# Altium footprint library FootPrintLib_3.PcbLib: 198 footprints (part 9 of 13)
Each footprint in its own frame and in the unit in brackets; x right, y up, seen from the top. Pads: shape width x height; smd on the part's side, far side on the other; paste and mask are expansions set on the pad; w line width, h text height; cw(c..) or ccw(c..) is an arc to the next point about the centre after c.
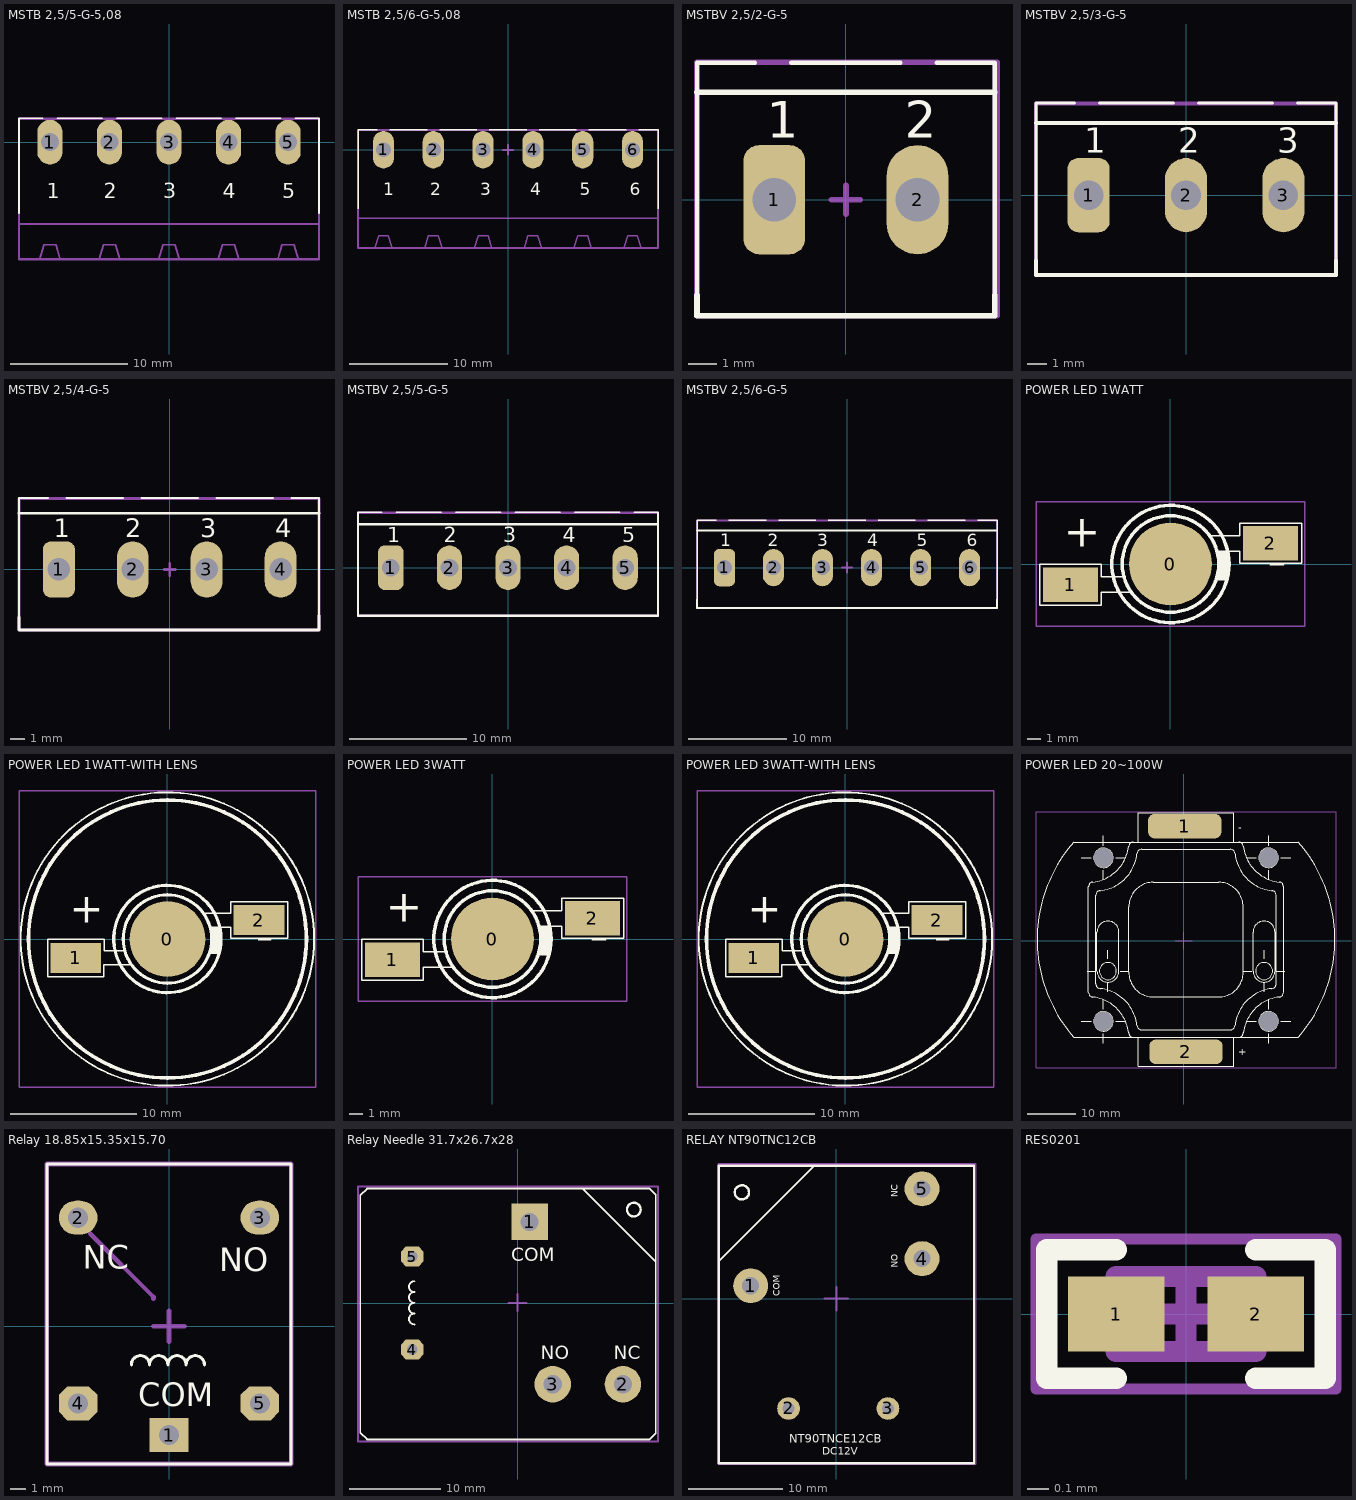
[diagram p8: the footprints below, top view; thin cyan lines are the x and y axes]

## MSTB 2,5/5-G-5,08 [mil] "Header, Nominal current: 12 A Rated voltage (III/2): 320 V Number of positions: 5 Pitch: 5,08 mm Color: green Contact surface: Tin Assembly: Soldering  DESIGNER ABBAS BASEREH"
height 338.58
pads (5):
  oval 85x150 hole 60: 1(-400,0) 2(-200,0) 3(0,0) 4(200,0) 5(400,0)
Top Overlay:
  lines w6: -503.94,-238.94 -503.94,80 -425,80 ; -375,80 -225,80 ; -175,80 -25,80 ; 25,80 175,80 ; 225,80 375,80 ; 425,80 503.94,80 503.94,-238.94
  text "5" at 380,-189.37 h50
  text "4" at 180,-189.37 h50
  text "3" at -20,-189.37 h50
  text "2" at -220,-189.37 h50
  text "1" at -410,-189.37 h50
Mechanical 13:
  lines w6: -503.94,-275 503.94,-275 ; -425,80 -503.94,80 -503.94,-238.94 -503.94,-395 -435,-395 ; -375,80 -225,80 ; -175,80 -25,80 ; 25,80 175,80 ; 225,80 375,80 ; 425,80 503.94,80 503.94,-238.94 503.94,-395 435,-395 ; -435,-395 -420,-345 -380,-345 -365,-395 ; -435,-395 -365,-395 ; -365,-395 -235,-395 ; -235,-395 -220,-345 -180,-345 -165,-395 ; -235,-395 -165,-395 ; -165,-395 -35,-395 ; -35,-395 35,-395 ; -35,-395 -20,-345 20,-345 35,-395 ; 35,-395 165,-395 ; 165,-395 235,-395 ; 165,-395 180,-345 220,-345 235,-395 ; 235,-395 365,-395 ; 365,-395 435,-395 ; 365,-395 380,-345 420,-345 435,-395
Mechanical 15:
  lines w7.87: -503.94,-393.7 503.94,-393.7 503.94,78.74 -503.94,78.74 -503.94,-393.7
3D body "User Library-MSTB 2,5-5-G-5,08 1759046.STEP": height 338.58, standoff -137.8, extent -500,-393.79 500,78.74

## MSTB 2,5/6-G-5,08 [mil] "Header, Nominal current: 12 A Rated voltage (III/2): 320 V Number of positions: 6 Pitch: 5,08 mm Color: green Contact surface: Tin Assembly: Soldering  DESIGNER ABBAS BASEREH"
height 338.58
pads (6):
  oval 85x150 hole 60: 1(-500,0) 2(-300,0) 3(-100,0) 4(100,0) 5(300,0) 6(500,0)
Top Overlay:
  lines w6: -602.36,-237.36 -602.36,80 -525,80 ; -475,80 -325,80 ; -275,80 -125,80 ; -75,80 75,80 ; 125,80 275,80 ; 325,80 475,80 ; 525,80 602.36,80 602.36,-237.36
  text "1" at -501.26,-182.48 h50
  text "2" at -311.26,-182.48 h50
  text "3" at -111.26,-182.48 h50
  text "4" at 88.74,-182.48 h50
  text "5" at 288.74,-182.48 h50
  text "6" at 488.74,-182.48 h50
Mechanical 13:
  lines w6: -602.36,-275 602.36,-275 ; -525,80 -602.36,80 -602.36,-237.36 -602.36,-395 -535,-395 ; -475,80 -325,80 ; -275,80 -125,80 ; -75,80 75,80 ; 125,80 275,80 ; 325,80 475,80 ; 525,80 602.36,80 602.36,-237.36 602.36,-395 535,-395 ; -535,-395 -520,-345 -480,-345 -465,-395 ; -535,-395 -465,-395 ; -465,-395 -335,-395 ; -335,-395 -320,-345 -280,-345 -265,-395 ; -335,-395 -265,-395 ; -265,-395 -135,-395 ; -135,-395 -65,-395 ; -135,-395 -120,-345 -80,-345 -65,-395 ; -65,-395 65,-395 ; 65,-395 135,-395 ; 65,-395 80,-345 120,-345 135,-395 ; 135,-395 265,-395 ; 265,-395 335,-395 ; 265,-395 280,-345 320,-345 335,-395 ; 335,-395 465,-395 ; 465,-395 535,-395 ; 465,-395 480,-345 520,-345 535,-395
Mechanical 15:
  lines w7.87: -19.68,0 19.68,0 ; 0,-19.68 0,19.68 ; -602.36,-393.7 -602.36,78.74 602.36,78.74 602.36,-393.7 -602.36,-393.7
3D body "User Library-MSTB 2,5-6-G-5,08 1759059.STEP": height 338.58, standoff -137.8, extent -600,-393.79 600,78.74

## MSTBV 2,5/2-G-5 [mil] "Header, Nominal current: 12 A Rated voltage (III/2): 320 V Number of positions: 2 Pitch: 5mm Color: green Contact surface: Tin Assembly: Soldering DESIGNER:ABBAS BASEREH"
height 338.58
pads (2):
  rrect50% 85x150 hole 60: 1(-98.43,0)
  oval 85x150 hole 60: 2(98.43,0)
Top Overlay:
  lines w6: -204.72,-131.46 -204.72,188.27 -125,188.27 ; -75,188.27 75,188.27 ; 125,188.27 204.72,188.27 204.72,-131.46
  lines w7.87: -204.72,-131.46 -204.72,-159.45 204.72,-159.45 204.72,-131.46 ; -204.72,147.64 204.72,147.64
  text "1" at -109.13,85.24 h50
  text "2" at 80.87,85.24 h50
Mechanical 13:
  lines w6: -204.72,-131.46 -204.72,188.27 -125,188.27 ; -75,188.27 75,188.27 ; 125,188.27 204.72,188.27 204.72,-131.46
Mechanical 15:
  lines w7.87: -19.68,0 19.68,0 ; 0,-19.68 0,19.69 ; -204.72,-159.45 207.68,-159.45 207.68,188.98 -203.74,188.98 -204.72,188.98 -204.72,-159.45
3D body "1753437.stEp": height 473.44, standoff -152.54, extent -196.85,-151.57 196.85,187.01

## MSTBV 2,5/3-G-5 [mil] "Header, Nominal current: 12 A Rated voltage (III/2): 320 V Number of positions: 3 Pitch: 5mm Color: green Contact surface: Tin Assembly: Soldering  DESIGNER:ABBAS BASEREH"
height 338.58
pads (3):
  rrect50% 85x150 hole 60: 1(-196.85,0)
  oval 85x150 hole 60: 2(0,0) 3(196.85,0)
Top Overlay:
  lines w6: -303.15,-131.85 -303.15,186.3 -225,186.3 ; -175,186.3 -25,186.3 ; 25,186.3 175,186.3 ; 225,186.3 303.15,186.3 303.15,-131.85
  lines w7.87: -303.15,-131.85 -303.15,-161.42 303.15,-161.42 303.15,-131.85 ; -303.15,145.67 303.15,145.67
  text "3" at 184.8,85.24 h50
  text "2" at -15.2,85.24 h50
  text "1" at -205.2,85.24 h50
Mechanical 13:
  lines w6: -303.15,-131.85 -303.15,186.3 -225,186.3 ; -175,186.3 -25,186.3 ; 25,186.3 175,186.3 ; 225,186.3 303.15,186.3 303.15,-131.85
Mechanical 15:
  lines w7.87: -303.15,-161.42 -303.15,185.04 303.15,185.04 303.15,-161.42 -299.21,-161.42 -303.15,-161.42
3D body "1753453.stEp": height 473.44, standoff -152.54, extent -295.28,-153.54 295.28,185.04

## MSTBV 2,5/4-G-5 [mil] "Header, Nominal current: 12 A Rated voltage (III/2): 320 V Number of positions: 4 Pitch: 5mm Color: green Contact surface: Tin Assembly: Soldering  DESIGNER ABBAS BASEREH"
height 338.58
pads (4):
  rrect50% 85x150 hole 60: 1(-295.28,0)
  oval 85x150 hole 60: 2(-98.43,0) 3(98.43,0) 4(295.28,0)
Top Overlay:
  lines w6: -401.57,-126.34 -401.57,190.24 -325,190.24 ; -275,190.24 -125,190.24 ; -75,190.24 75,190.24 ; 125,190.24 275,190.24 ; 325,190.24 397.64,190.24 397.64,-122.4
  lines w7.87: -401.57,-126.34 -401.57,-161.42 397.64,-161.42 397.64,-122.4 ; -401.57,149.61 397.64,149.61
  text "1" at -309.13,85.24 h50
  text "2" at -119.13,85.24 h50
  text "3" at 80.87,85.24 h50
  text "4" at 280.87,85.24 h50
Mechanical 13:
  lines w6: -401.57,-126.34 -401.57,190.24 -325,190.24 ; -275,190.24 -125,190.24 ; -75,190.24 75,190.24 ; 125,190.24 275,190.24 ; 325,190.24 397.64,190.24 397.64,-122.4
Mechanical 15:
  lines w7.87: -15.75,0 15.75,0 ; 0,-15.75 0,15.75 ; -401.57,-161.42 -401.57,188.98 397.64,188.98 397.64,-161.42 -401.57,-161.42
3D body "1753479.stEp": height 472.44, standoff -153.54, extent -393.7,-152.56 393.7,186.02

## MSTBV 2,5/5-G-5 [mil] "Header, Nominal current: 12 A Rated voltage (III/2): 320 V Number of positions: 5 Pitch: 5mm Color: green Contact surface: Tin Assembly: Soldering  DESIGNER ABBAS BASEREH"
height 338.58
pads (5):
  rrect50% 85x150 hole 60: 1(-393.7,0)
  oval 85x150 hole 60: 2(-196.85,0) 3(0,0) 4(196.85,0) 5(393.7,0)
Top Overlay:
  lines w6: -503.94,-132.64 -503.94,186.3 -425,186.3 ; -375,186.3 -225,186.3 ; -175,186.3 -25,186.3 ; 25,186.3 175,186.3 ; 225,186.3 375,186.3 ; 425,186.3 503.94,186.3 503.94,-132.64
  lines w7.87: -503.94,-132.64 -503.94,-161.42 503.94,-161.42 503.94,-132.64 ; -503.94,145.67 503.94,145.67
  text "5" at 383.94,86.22 h50
  text "4" at 183.94,86.22 h50
  text "3" at -16.06,86.22 h50
  text "2" at -216.06,86.22 h50
  text "1" at -406.06,86.22 h50
Mechanical 13:
  lines w6: -503.94,-132.64 -503.94,186.3 -425,186.3 ; -375,186.3 -225,186.3 ; -175,186.3 -25,186.3 ; 25,186.3 175,186.3 ; 225,186.3 375,186.3 ; 425,186.3 503.94,186.3 503.94,-132.64
Mechanical 15:
  lines w7.87: -503.94,-161.42 503.94,-161.42 503.94,185.04 -503.94,185.04 -503.94,-161.42
3D body "1753495.stEp": height 472.44, standoff -153.54, extent -492.13,-153.54 492.13,185.04

## MSTBV 2,5/6-G-5 [mil] "Header, Nominal current: 12 A Rated voltage (III/2): 320 V Number of positions: 6 Pitch: 5mm Color: green Contact surface: Tin Assembly: Soldering  DESIGNER ABBAS BASEREH"
height 338.58
pads (6):
  rrect50% 85x150 hole 60: 1(-492.13,0)
  oval 85x150 hole 60: 2(-295.28,0) 3(-98.43,0) 4(98.43,0) 5(295.28,0) 6(492.13,0)
Top Overlay:
  lines w6: -602.36,-127.13 -602.36,190.24 -525,190.24 ; -475,190.24 -325,190.24 ; -275,190.24 -125,190.24 ; -75,190.24 75,190.24 ; 125,190.24 275,190.24 ; 325,190.24 475,190.24 ; 525,190.24 602.36,190.24 602.36,-127.13
  lines w7.87: -602.36,-127.13 -602.36,-161.42 602.36,-161.42 602.36,-127.13 ; -602.36,149.61 602.36,149.61
  text "6" at 480.87,85.24 h50
  text "5" at 280.87,85.24 h50
  text "4" at 80.87,85.24 h50
  text "3" at -119.13,85.24 h50
  text "2" at -319.13,85.24 h50
  text "1" at -509.13,85.24 h50
Mechanical 13:
  lines w6: -602.36,-127.13 -602.36,190.24 -525,190.24 ; -475,190.24 -325,190.24 ; -275,190.24 -125,190.24 ; -75,190.24 75,190.24 ; 125,190.24 275,190.24 ; 325,190.24 475,190.24 ; 525,190.24 602.36,190.24 602.36,-127.13
Mechanical 15:
  lines w7.87: -19.68,0 19.68,0 ; 0,-19.68 0,19.68 ; -602.36,-161.42 602.36,-161.42 602.36,188.98 -602.36,188.98 -602.36,-161.42
3D body "1753518.stEp": height 472.44, standoff -153.54, extent -590.55,-153.54 590.55,185.04

## POWER LED 1WATT [mm] "DESIGNER : ABBAS BASEREH"
height 6
pads (3):
  round 6 smd: 0(0,0)
  rect 4x2.5 smd: 1(-7.25,-1.5) 2(7.25,1.5)
Top Overlay:
  circle w0.254: c0,0 r4.25
  circle w0.254: c0,0 r3.5
  rectangle: 3.405,-1.185 4.185,0.93
  lines w0.1: -3.315,-0.915 -5.01,-0.915 -5.01,-0.015 -9.465,-0.015 -9.465,-1.335 -9.465,-2.985 -5.025,-2.985 -5.025,-2.055 -2.88,-2.055 ; 2.64,2.31 2.91,2.04 5.01,2.04 5.01,2.94 9.06,2.94 9.51,2.94 9.51,0.72 9.51,0.06 5.01,0.06 5.01,0.93 3.45,0.93 3.45,0.675
  text "-" at 7,-2 h5
  text "+" at -7.75,0.5 h4
Mechanical 15:
  lines w0.1: -0.5,0 0.5,0 ; 0,-0.5 0,0.5 ; -9.75,-4.5 9.75,-4.5 9.75,4.5 -9.75,4.5 -9.75,-4.5
3D body "SW3dPS-Power LED2.STEP": height 5.55, standoff 0, extent -7.25,-4 7.25,4

## POWER LED 1WATT-WITH LENS [mm] "DESIGNER : ABBAS BASEREH"
height 13
pads (3):
  round 6 smd: 0(0,0)
  rect 4x2.4 smd: 1(-7.25,-1.5) 2(7.25,1.5)
Top Overlay:
  circle w0.15: c0,0 r11.613
  circle w0.254: c0,0 r4.25
  circle w0.254: c0,0 r3.5
  circle w0.3: c0,0 r11
  rectangle: 3.405,-1.185 4.185,0.93
  lines w0.1: -3.315,-0.915 -5.01,-0.915 -5.01,-0.015 -9.465,-0.015 -9.465,-1.335 -9.465,-2.985 -5.025,-2.985 -5.025,-2.055 -2.88,-2.055 ; 2.64,2.31 2.91,2.04 5.01,2.04 5.01,2.94 9.06,2.94 9.51,2.94 9.51,0.72 9.51,0.06 5.01,0.06 5.01,0.93 3.45,0.93 3.45,0.675
  text "-" at 7,-2 h5
  text "+" at -7.75,0.5 h4
Mechanical 15:
  lines w0.1: -0.75,0 0.75,0 ; 0,-0.75 0,0.75 ; -11.75,-11.75 11.75,-11.75 11.75,11.75 -11.75,11.75 -11.75,-11.75
3D body: height 13, standoff 0, extent -11,-11 11,11.1
3D body "User Library-FL-36.STEP": height 14, standoff -0.15, extent -9.697,-9.75 9.697,9.85
3D body "SW3dPS-Power LED2.STEP": height 5.55, standoff 0, extent -7.25,-4 7.25,4

## POWER LED 3WATT [mm] "DESIGNER : ABBAS BASEREH"
height 6
pads (3):
  round 6 smd: 0(0,0)
  rect 4x2.5 smd: 1(-7.25,-1.5) 2(7.25,1.5)
Top Overlay:
  circle w0.254: c0,0 r3.5
  circle w0.254: c0,0 r4.25
  rectangle: 3.405,-1.185 4.185,0.93
  lines w0.1: -3.315,-0.915 -5.01,-0.915 -5.01,-0.015 -9.465,-0.015 -9.465,-1.335 -9.465,-2.985 -5.025,-2.985 -5.025,-2.055 -2.88,-2.055 ; 2.64,2.31 2.91,2.04 5.01,2.04 5.01,2.94 9.06,2.94 9.51,2.94 9.51,0.72 9.51,0.06 5.01,0.06 5.01,0.93 3.45,0.93 3.45,0.675
  text "+" at -7.75,0.5 h4
  text "-" at 7,-2 h5
Mechanical 15:
  lines w0.1: -0.5,0 0.5,0 ; 0,-0.5 0,0.5 ; -9.75,-4.5 -9.75,4.5 9.75,4.5 9.75,-4.5 -9.75,-4.5
3D body "User Library-zled_p4-1.STEP": height 5.2, standoff 0, extent -7.25,-4 7.25,4

## POWER LED 3WATT-WITH LENS [mm] "DESIGNER : ABBAS BASEREH"
height 13
pads (3):
  round 6 smd: 0(0,0)
  rect 4x2.4 smd: 1(-7.25,-1.5) 2(7.25,1.5)
Top Overlay:
  circle w0.15: c0,0 r11.613
  circle w0.254: c0,0 r4.25
  circle w0.254: c0,0 r3.5
  circle w0.3: c0,0 r11
  rectangle: 3.405,-1.185 4.185,0.93
  lines w0.1: -3.315,-0.915 -5.01,-0.915 -5.01,-0.015 -9.465,-0.015 -9.465,-1.335 -9.465,-2.985 -5.025,-2.985 -5.025,-2.055 -2.88,-2.055 ; 2.64,2.31 2.91,2.04 5.01,2.04 5.01,2.94 9.06,2.94 9.51,2.94 9.51,0.72 9.51,0.06 5.01,0.06 5.01,0.93 3.45,0.93 3.45,0.675
  text "-" at 7,-2 h5
  text "+" at -7.75,0.5 h4
Mechanical 15:
  lines w0.1: -0.75,0 0.75,0 ; 0,-0.75 0,0.75 ; -11.75,-11.75 11.75,-11.75 11.75,11.75 -11.75,11.75 -11.75,-11.75
3D body: height 13, standoff 0, extent -11,-11 11,11.1
3D body "User Library-FL-36.STEP": height 14, standoff -0.15, extent -9.697,-9.75 9.697,9.85
3D body "User Library-zled_p4-1.STEP": height 5.2, standoff 0, extent -7.25,-4 7.25,4

## POWER LED 20~100W [mm] "DESIGNER ABBAS BASEREH"
height 5
pads (6):
  rrect50% 15x5 smd: 1(0.25,23.5) 2(0.5,-22.75)
  round 4 hole 4: SCREW(-16.431,-16.508) SCREW(-16.431,17.008) SCREW(17.431,-16.508) SCREW(17.431,17.008)
Top Overlay:
  circle w0.013: c-16.431,-16.508 r2
  circle w0.013: c-16.431,17.008 r2
  circle w0.013: c17.431,-16.508 r2
  circle w0.013: c17.431,17.008 r2
  circle w0.013: c-4.5,-22.75 r1
  circle w0.013: c5.5,-22.75 r1
  circle w0.013: c0.5,-22.75 r1
  circle w0.013: c5.558,23.25 r1
  circle w0.013: c0.5,23.25 r1
  circle w0.013: c-4.442,23.25 r1
  circle w0.013: c-15.5,-6.197 r1.75
  circle w0.013: c16.5,-6.197 r1.75
  lines w0.013: -20.931,-16.508 -18.931,-16.508 ; -20.931,17.008 -18.931,17.008 ; -19.75,-6.197 -18,-6.197 ; -16.431,-21.008 -16.431,-19.008 ; -16.431,-14.008 -16.431,-12.008 ; -16.431,12.508 -16.431,14.508 ; -16.431,19.508 -16.431,21.508 ; -15.5,-10.447 -15.5,-8.697 ; -15.5,-3.697 -15.5,-1.947 ; -13.931,-16.508 -11.931,-16.508 ; -13.931,17.008 -11.931,17.008 ; -13,-6.197 -11.25,-6.197 ; -9.275,-19.75 -9.275,-25.75 10.275,-25.75 10.275,-19.75 ; -9.275,20.25 -9.275,26.25 10.275,26.25 10.275,20.25 ; 12.25,-6.197 14,-6.197 ; 12.931,-16.508 14.931,-16.508 ; 12.931,17.008 14.931,17.008 ; 16.5,-10.447 16.5,-8.697 ; 16.5,-3.697 16.5,-1.947 ; 17.431,-21.008 17.431,-19.008 ; 17.431,-14.008 17.431,-12.008 ; 17.431,12.508 17.431,14.508 ; 17.431,19.508 17.431,21.508 ; 19,-6.197 20.75,-6.197 ; 19.931,-16.508 21.931,-16.508 ; 19.931,17.008 21.931,17.008 ; -10.275,-19.75 cw(c-10.275,-18.75) -11.269,-18.861 ccw(c-19.5,-19.777) -18.608,-11.544 cw(c-18.5,-10.549) -19.5,-10.549 -19.5,11.049 cw(c-18.5,11.049) -18.608,12.044 ccw(c-19.5,20.277) -11.269,19.361 cw(c-10.275,19.25) -10.275,20.25 ; -10.275,-19.75 -22.535,-19.75 cw(c0.5,0.25) -22.535,20.25 -10.275,20.25 ; -10.275,-19.75 11.275,-19.75 ; -10.275,20.25 11.275,20.25 ; 11.275,-19.75 ccw(c11.275,-18.75) 12.269,-18.861 cw(c20.5,-19.777) 19.608,-11.544 ccw(c19.5,-10.549) 20.5,-10.549 20.5,11.049 ccw(c19.5,11.049) 19.608,12.044 cw(c20.5,20.277) 12.269,19.361 ccw(c11.275,19.25) 11.275,20.25 ; 11.275,-19.75 23.535,-19.75 ccw(c0.5,0.25) 23.535,20.25 11.275,20.25 ; -18,-8.803 ccw(c-17,-8.803) -17.105,-9.797 cw(c-18,-18.25) -9.547,-17.355 ccw(c-8.553,-17.25) -8.553,-18.25 9.553,-18.25 ccw(c9.553,-17.25) 10.547,-17.355 cw(c19,-18.25) 18.105,-9.797 ccw(c18,-8.803) 19,-8.803 19,9.303 ccw(c18,9.303) 18.105,10.297 cw(c19,18.75) 10.547,17.855 ccw(c9.553,17.75) 9.553,18.75 -8.553,18.75 ccw(c-8.553,17.75) -9.547,17.855 cw(c-18,18.75) -17.105,10.297 ccw(c-17,9.303) -18,9.303 -18,-8.803 ; -17.75,-6.197 ccw(c-15.5,-6.197) -13.25,-6.197 -13.25,1.803 ccw(c-15.5,1.803) -17.75,1.803 -17.75,-6.197 ; -11.218,-6.495 ccw(c-6.218,-6.495) -6.218,-11.495 7.218,-11.495 ccw(c7.218,-6.495) 12.218,-6.495 12.218,6.995 ccw(c7.218,6.995) 7.218,11.995 -6.218,11.995 ccw(c-6.218,6.995) -11.218,6.995 -11.218,-6.495 ; 14.25,-6.197 ccw(c16.5,-6.197) 18.75,-6.197 18.75,1.803 ccw(c16.5,1.803) 14.25,1.803 14.25,-6.197
  text "-" at 11.25,22.5 h1.52
  text "+" at 11.25,-23.5 h1.52
Mechanical 15:
  lines w0.1: -1.75,0 1.75,0 ; 0,-1.75 0,1.75 ; -30.25,-26 -30.25,26.5 31.25,26.5 31.25,-26 -30.25,-26
3D body "APPLICATION LED-50w - 100w.STEP": height 4.4, standoff 0, extent -30.006,-25.75 31.006,26.25

## Relay 18.85x15.35x15.70 [mm] "DESIGNER ABBAS BASEREH"
height 15.7
pads (5):
  rect 2.5x2.2 hole 1.3: 1(0,-7.025)
  oval 2.5x2.2 hole 1.3: 2(-5.875,7.025) 3(5.875,7.025)
  oct 2.5x2.2 hole 1.3: 4(-5.875,-4.975) 5(5.875,-4.975)
Top Overlay:
  lines w0.2: -2.438,-2.48 cw(c-1.847,-2.48) -1.256,-2.48 cw(c-0.665,-2.48) -0.074,-2.48 cw(c0.517,-2.48) 1.108,-2.48 cw(c1.699,-2.48) 2.29,-2.48 ; -7.9,-8.9 -7.9,10.5 7.9,10.5 7.9,-8.9 -7.9,-8.9
  text "COM" at -1.981,-5.182 h1.5
  text "NO" at 3.251,3.556 h1.5
  text "NC" at -5.588,3.734 h1.5
Mechanical 15:
  lines w0.3: -5.1,6 -1,1.9 -1,1.8 ; -1,0 1,0 ; 0,-1 0,1 ; -7.9,-8.9 -7.9,10.5 7.9,10.5 7.9,-8.9 -7.9,-8.9
3D body "User Library-Relay SPDT.STEP": height 15.6, standoff -3.8, extent -7.75,-8.7 7.75,10.3

## Relay Needle 31.7x26.7x28 [mm] "DESIGNER ABBAS BASEREH"
height 28
pads (5):
  rect 4x4 hole 2: 1(1.31,8.9)
  round 4 hole 2: 2(11.55,-8.9) 3(3.85,-8.9)
  oct 2.5x2.2 hole 1.2: 4(-11.55,-5.1) 5(-11.55,5.1)
Top Overlay:
  circle w0.254: c12.75,10.25 r0.75
  lines w0.2: -11.32,-2.338 cw(c-11.32,-1.747) -11.32,-1.156 cw(c-11.32,-0.565) -11.32,0.026 cw(c-11.32,0.617) -11.32,1.208 cw(c-11.32,1.799) -11.32,2.39 ; 7.15,12.55 15.15,4.55 ; -17.25,-14.2 -17.25,11.8 -16.5,12.55 14.5,12.55 15.15,11.9 15.15,-14.3 14.5,-14.95 -16.5,-14.95 -17.25,-14.2
  text "NC" at 10.55,-6.15 h1.5
  text "NO" at 2.55,-6.15 h1.5
  text "COM" at -0.7,4.6 h1.5
Mechanical 15:
  lines w0.2: -1,0 1,0 ; 0,-0.9 0,1 ; -17.5,-15.2 -17.5,12.8 15.4,12.8 15.4,-15.2 -17.5,-15.2
3D body "AZ2100_1C-XXXX_POWER RELAY.SLDPRT": height 28.04, standoff -3.46, extent -17.179,-14.932 15.079,12.5

## RELAY NT90TNC12CB [mm] "31.7x26.7x28 DESIGNER:ABBAS BASEREH"
height 28
pads (5):
  round 3.7 hole 1.8: 1(-9.068,1.365) 4(9.068,4.235) 5(9.068,11.626)
  round 2.4 hole 1.3: 2(-5.062,-11.626) 3(5.46,-11.626)
Top Overlay:
  circle w0.254: c-10,11.25 r0.75
  lines w0.2: -12.433,4.1 -12.3,4.1 -2.4,14
  lines w0.254: -12.433,-17.431 14.567,-17.431 14.567,14.069 -12.433,14.069 -12.433,-17.431
  text "NT90TNCE12CB" at -5,-15.25 h0.9
  text "DC12V" at -1.5,-16.5 h0.8
  text "COM" at -6,0.25 h0.7
  text "NO" at 6.5,3.25 h0.7
  text "NC" at 6.5,10.75 h0.7
Mechanical 15:
  lines w0.2: -1.25,0 1.25,0 ; 0,-1.25 0,1.25 ; -12.5,-17.5 14.75,-17.5 14.75,14.25 -12.5,14.25 -12.5,-17.5
3D body "relay.STEP": height 27.76, standoff -5.44, extent -12.425,-17.425 14.575,14.075

## RES0201 [mm] "Chip Resistor, 2-Leads, Body 0/60x0/30mm, IPC Medium Density DESIGNER:ABBAS BASEREH"
height 0.23
pads (2):
  rect 0.45x0.35 smd mask+0.04: 1(-0.325,0) 2(0.325,0)
Top Overlay:
  lines w0.1: -0.325,-0.3 -0.65,-0.3 -0.65,0.3 -0.325,0.3 ; 0.325,-0.3 0.65,-0.3 0.65,0.3 0.325,0.3
Mechanical 13:
  lines w0.1: -0.325,-0.175 0.325,-0.175 0.325,0.175 -0.325,0.175 -0.325,-0.175
Mechanical 15:
  lines w0.05: -0.7,-0.35 0.7,-0.35 0.7,0.35 -0.7,0.35 -0.7,-0.35
  lines w0.1: -0.175,0 0.175,0 ; 0,-0.175 0,0.175
3D body "RES0201.step": height 0.23, standoff 0, extent -0.325,-0.175 0.325,0.175